# Altium schematic symbol library A-USB_2-A-E.SchLib: 1 symbol
Pins are listed as number, name and electrical type; pins without a type are passive.

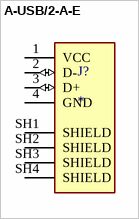
[diagram p0: symbol A-USB/2-A-E]

## A-USB/2-A-E
designator J?
USB-A (USB TYPE-A) USB 2.0 Receptacle Connector 4 Position Through Hole, Right Angle; MP: A-USB/2-A-E; MF: Assmann; Check_prices: https://www.snapeda.com/parts/A-USB/2-A-E/Assmann+WSW+Components/view-part/?ref=eda; Price: None; SnapEDA_Link: https://www.snapeda.com/parts/A-USB/2-A-E/Assmann+WSW+Components/view-part/?ref=snap; Package: None; Value: *; Availability: In Stock; Purchase-URL: https://pricing.snapeda.com/search/part/A-USB/2-A-E/?ref=eda
footprint ASSMANN_A-USB/2-A-E
pins: 1 VCC (power), 2 D- (io), 3 D+ (io), 4 GND (power), SH1 SHIELD (power), SH2 SHIELD (power), SH3 SHIELD (power), SH4 SHIELD (power)